# Altium integrated library TP.IntLib: 1 symbol
Pins are listed as number, name and electrical type; pins without a type are passive.

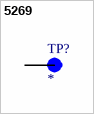
[diagram p0: symbol 5269]

## 5269
designator TP?
TEST POINT (PURPLE) - MINIATURE; MF: Keystone Electronics; MP: 5269; SnapEDA_Link: https://www.snapeda.com/parts/5269/Keystone/view-part/?ref=snap; Package: None; Value: *; Check_prices: https://www.snapeda.com/parts/5269/Keystone/view-part/?ref=eda
footprint KEYSTONE_5269
pins: TP